# Altium integrated library ZMCT103C.IntLib: 1 symbol
Pins are listed as number, name and electrical type; pins without a type are passive.

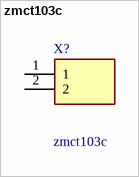
[diagram p0: symbol zmct103c]

## zmct103c
designator X?
ZMCT103D CURRENT TRANSFORMER; Manufacturer_Name: Qingxian Zeming Langxi Electronic; Geometry.Height: 19.2mm; Manufacturer_Part_Number: zmct103c; Mouser Part Number: *; Mouser Price/Stock: *; Arrow Part Number: *; Arrow Price/Stock: *; Datasheet Link: https://www.alldatasheet.com/datasheet-pdf/pdf/1150711/ETC2/ZMCT103D.html
footprint zmct103c
pins: 1, 2